# Altium footprint library TitansLib.PcbLib: 333 footprints (part 1 of 21)
Each footprint in its own frame and in the unit in brackets; x right, y up, seen from the top. Pads: shape width x height; smd on the part's side, far side on the other; paste and mask are expansions set on the pad; w line width, h text height; cw(c..) or ccw(c..) is an arc to the next point about the centre after c.
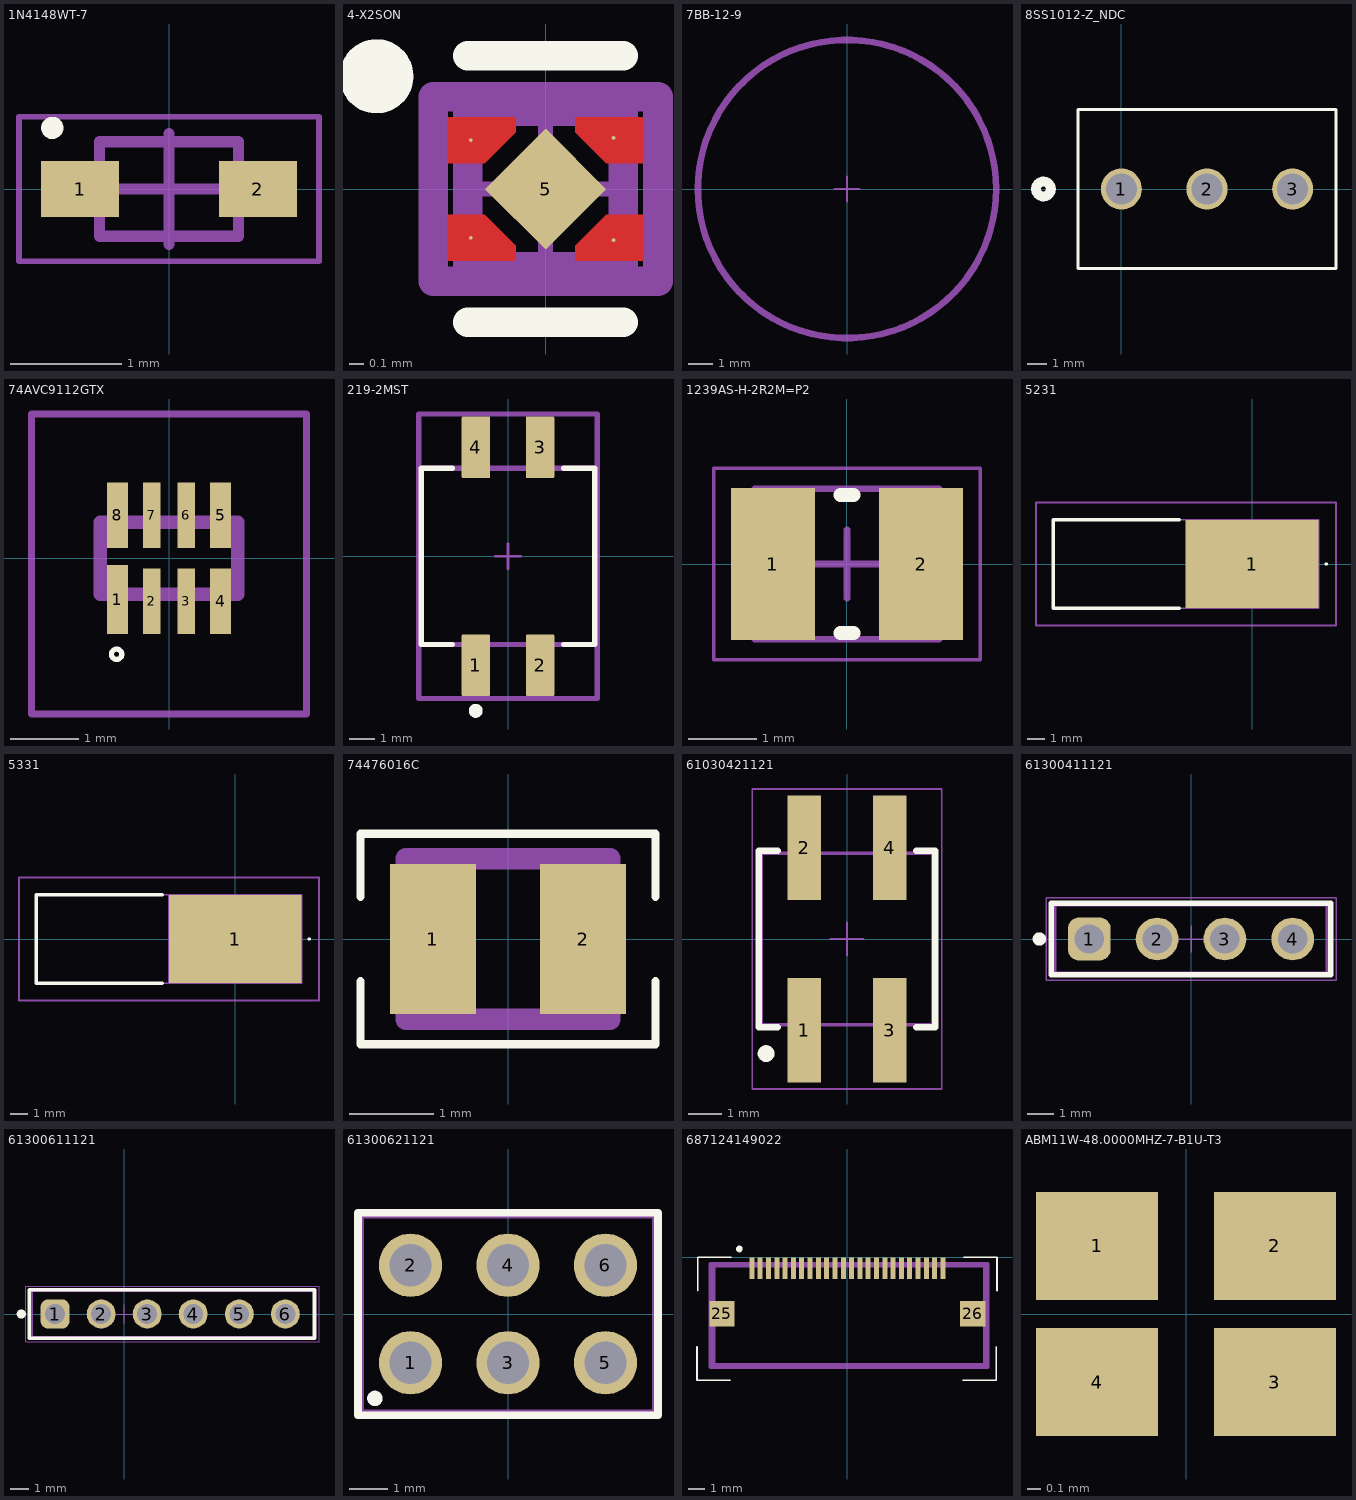
[diagram p0: the footprints below, top view; thin cyan lines are the x and y axes]

## 1N4148WT-7 [mm] "SODFL, 2-Leads, Body 0,80x1,60mm, IPC Low Density"
height 0.65
pads (2):
  rect 0.7x0.5 smd: 1(-0.8,0) 2(0.8,0)
Top Overlay:
  circle w0.1: c-1.05,0.55 r0.05
Top Courtyard:
  lines w0.05: -1.35,-0.65 -1.35,0.65 1.35,0.65 1.35,-0.65 -1.35,-0.65
  lines w0.1: -0.5,0 0.5,0 ; 0,-0.5 0,0.5
Top Assembly:
  lines w0.1: -0.625,-0.425 -0.625,0.425 0.625,0.425 0.625,-0.425 -0.625,-0.425
3D body "Diode_Diodes_Inc_SDM03U40-7_eec.STEP": height 0.25, standoff 0, extent -1.1,-0.525 1.1,0.525

## 4-X2SON [mil]
pads (5):
  round 1 smd paste-99999 mask-39370.1: 1(-19.88,12.99)
  round 1 smd paste-39370.1 mask-39370.1: 2(-19.88,-12.99) 3(18.08,-13.6) 4(18.08,13.6)
  rect 22.83x22.83 smd rot 135 paste-39370.1 mask-39370.1: 5(0,0)
Top Layer:
  region: -25.98,-19.09 -7.87,-19.09 -7.87,-15.16 -16.14,-6.89 -25.98,-6.89
  region: 25.98,19.09 7.87,19.09 7.87,15.16 16.14,6.89 25.98,6.89
  region: 25.98,-19.09 7.87,-19.09 7.87,-15.16 16.14,-6.89 25.98,-6.89
  region: -25.98,19.09 -7.87,19.09 -7.87,15.16 -16.14,6.89 -25.98,6.89
Top Overlay:
  circle w9.84: c-45,30 r4.92
  lines w7.87: -20.67,-35.43 20.67,-35.43 ; -20.67,35.43 20.67,35.43
Top Paste:
  region: -12.53,0 0,-12.53 12.53,0 0,12.53
  region: 25.59,-17.13 9.84,-17.13 9.84,-15.94 16.93,-8.86 25.59,-8.86
  region: -25.59,-17.13 -9.84,-17.13 -9.84,-15.94 -16.93,-8.86 -25.59,-8.86
  region: 25.59,17.13 9.84,17.13 9.84,15.94 16.93,8.86 25.59,8.86
  region: -25.59,17.13 -9.84,17.13 -9.84,15.94 -16.93,8.86 -25.59,8.86
Top Solder:
  region: -13.36,0 0,-13.36 13.36,0 0,13.36
  region: -24.02,-17.13 -9.84,-17.13 -9.84,-15.94 -16.93,-8.86 -24.02,-8.86
  region: 24.02,-17.13 9.84,-17.13 9.84,-15.94 16.93,-8.86 24.02,-8.86
  region: 24.02,17.13 9.84,17.13 9.84,15.94 16.93,8.86 24.02,8.86
  region: -24.02,17.13 -9.84,17.13 -9.84,15.94 -16.93,8.86 -24.02,8.86
Top 3D Body:
  lines w7.87: -20.67,-20.67 -20.67,20.67 20.67,20.67 20.67,-20.67 -20.67,-20.67
Top Courtyard:
  lines w7.87: -29.92,-24.61 -29.92,24.61 29.92,24.61 29.92,-24.61 -29.92,-24.61
Top Component Center:
  lines w3.94: -19.68,0 19.68,0 ; 0,-19.68 0,19.68
Top Assembly:
  lines w7.87: -29.92,-24.61 -29.92,24.61 29.92,24.61 29.92,-24.61 -29.92,-24.61
3D body "IC_Texas_Instruments_LP5907SNX-2_8-NOPB_eec.STEP": height 10, standoff 0, extent -29.92,-24.61 29.92,24.61

## 7BB-12-9 [mm]
Top 3D Body:
  circle w0.15: c0,0 r6.1
Top Courtyard:
  lines w0.2: -6.2,0 cw(c0,0) 6.2,0 cw(c0,0) -6.2,0
Top Component Center:
  lines w0.1: -0.5,0 0.5,0 ; 0,-0.5 0,0.5
3D body "Speak_Murata_7BB-12-9_eec.STEP": height 0.25, standoff 0, extent -6.2,-6.2 6.2,6.2

## 8SS1012-Z_NDC [mil]
pads (3):
  round 83 / inner round 60 / far side round 83 hole 63 paste-99999 mask+0: 1(0,0) 2(173.23,0) 3(346.46,0)
Top Overlay:
  circle w20: c-157.77,0 r15
  lines w6: -87.77,-160.5 434.23,-160.5 434.23,160.5 -87.77,160.5 -87.77,-160.5
Bottom Overlay:
  circle w20: c-157.77,0 r15
3D body "8SS1012-Z.stp": height 610.24, standoff -184.88, extent -82.68,-155.51 429.13,155.51

## 74AVC9112GTX [mm]
pads (8):
  rect 0.3x1 smd: 1(-0.75,-0.6)
  rect 0.25x0.95 smd: 2(-0.25,-0.625) 3(0.25,-0.625) 6(0.25,0.625) 7(-0.25,0.625)
  rect 0.3x0.95 smd: 4(0.75,-0.625) 5(0.75,0.625) 8(-0.75,0.625)
Top Overlay:
  lines w0.075: -0.837,-1.397 cw(c-0.762,-1.397) -0.687,-1.397 cw(c-0.762,-1.397) -0.837,-1.397
Mechanical 13:
  lines w0.2: -1,-0.525 1,-0.525 1,0.525 -1,0.525 -1,-0.525
Mechanical 15:
  lines w0.1: -2,-2.266 2,-2.266 2,2.1 -2,2.1 -2,-2.266
3D body "74LVC2G53GT,115.stp": height 0.48, standoff 0, extent -0.975,-0.584 0.975,0.416

## 219-2MST [mil]
pads (4):
  rrect8% 44x96 smd paste+0 mask+1.97: 1(-50,-169.5) 2(50,-169.5) 3(50,169.5) 4(-50,169.5)
Top Overlay:
  circle w11.81: c-50.2,-240.55 r4.92
  lines w7.87: -86.76,-137 -135,-137 -135,137 -86.76,137 ; 86.76,-137 135,-137 135,137 86.76,137
Top 3D Body:
  lines w7.87: -135,-137 -135,137 135,137 135,-137 -135,-137
Top Courtyard:
  lines w7.87: -138.94,-221.44 -138.94,221.44 138.94,221.44 138.94,-221.44 -138.94,-221.44
Top Component Center:
  lines w3.94: -19.68,0 19.68,0 ; 0,-19.68 0,19.68
Top Assembly:
  lines w7.87: -138.94,-221.44 -138.94,221.44 138.94,221.44 138.94,-221.44 -138.94,-221.44
3D body "Switch_CTS_Components_219-2MST_eec.STEP": height 10, standoff 0, extent -138.94,-221.44 138.94,221.44

## 1239AS-H-2R2M=P2 [mm] "Chip Inductor, 2-Leads, Body 2,50x2,00mm, IPC Medium Density"
height 1.2
pads (2):
  rect 1.23x2.22 smd: 1(-1.085,0) 2(1.085,0)
Top Overlay:
  lines w0.2: -0.1,-1.01 0.1,-1.01 ; -0.1,1.01 0.1,1.01
Top Courtyard:
  lines w0.05: -1.95,-1.4 -1.95,1.4 1.95,1.4 1.95,-1.4 -1.95,-1.4
  lines w0.1: -0.5,0 0.5,0 ; 0,-0.5 0,0.5
Top Assembly:
  lines w0.1: -1.35,-1.1 -1.35,1.1 1.35,1.1 1.35,-1.1 -1.35,-1.1
3D body: height 1.2, standoff 0, extent -0.75,-1.1 0.75,1.1
3D body: height 1.2, standoff 0, extent -1.35,-1.1 -0.75,1.1
3D body: height 1.2, standoff 0, extent 0.75,-1.1 1.35,1.1

## 5231 [mm]
pads (1):
  rect 7.62x5.08 smd: 1(0,0)
Top Overlay:
  lines w0.1: 4.2,0 ccw(c4.25,0) 4.3,0 ccw(c4.25,0) 4.2,0
  lines w0.2: -4.2,-2.54 -11.43,-2.54 -11.43,2.54 -4.2,2.54
Mechanical 13:
  lines w0.1: -3.81,-2.54 -11.43,-2.54 -11.43,2.54 -3.81,2.54 ; -3.81,-2.54 -3.81,2.54 ; -3.81,-2.54 3.81,-2.54 3.81,2.54 -3.81,2.54
Mechanical 15:
  lines w0.1: -12.43,-3.54 -12.43,3.54 4.81,3.54 4.81,-3.54 -12.43,-3.54
3D body "5231.stp": height 14.44, standoff 0, extent -11.306,-2.54 3.68,2.54

## 5331 [mm]
pads (1):
  rect 7.62x5.08 smd: 1(0,0)
Top Overlay:
  lines w0.1: 4.2,0 ccw(c4.25,0) 4.3,0 ccw(c4.25,0) 4.2,0
  lines w0.2: -4.2,-2.54 -11.43,-2.54 -11.43,2.54 -4.2,2.54
Mechanical 13:
  lines w0.1: -3.81,-2.54 -11.43,-2.54 -11.43,2.54 -3.81,2.54 ; -3.81,-2.54 -3.81,2.54 ; -3.81,-2.54 3.81,-2.54 3.81,2.54 -3.81,2.54
Mechanical 15:
  lines w0.1: -12.43,-3.54 -12.43,3.54 4.81,3.54 4.81,-3.54 -12.43,-3.54
3D body "keystone-PN5331.STEP": height 13.83, standoff 0, extent -11.43,-2.54 3.81,2.54

## 74476016C [mm]
pads (2):
  rect 1.02x1.78 smd: 1(-0.89,0) 2(0.89,0)
Top Overlay:
  lines w0.1: -1.75,-0.5 -1.75,-1.25 1.75,-1.25 1.75,-0.5 ; -1.75,0.5 -1.75,1.25 1.75,1.25 1.75,0.5
Top Assembly:
  lines w0.1: -1.133,-0.873 -1.133,0.873 1.133,0.873 1.133,-0.873 -1.133,-0.873
  text ".Designator" at -0.875,-0.187 h1
Mechanical 15:
  lines w0.254: -1.21,-0.95 -1.21,0.95 1.21,0.95 1.21,-0.95 -1.21,-0.95
3D body "74476016C.stp": height 1.29, standoff -0.03, extent -1.151,-0.84 1.129,0.86

## 61030421121 [mm] "Pin Header, pitch 2.54 mm, SMD, Vertical, dual row, 4p"
height 9.6
pads (4):
  rect 1x3.1 smd: 1(-1.27,-2.7) 2(-1.27,2.7) 3(1.27,-2.7) 4(1.27,2.7)
Top Overlay:
  circle w0.25: c-2.4,-3.4 r0.125
  lines w0.2: -2.065,-2.615 -2.615,-2.615 -2.615,2.615 -2.065,2.615 ; 2.065,-2.615 2.615,-2.615 2.615,2.615 2.065,2.615
Top Courtyard:
  lines w0.05: -2.815,-4.45 -2.815,4.45 2.815,4.45 2.815,-4.45 -2.815,-4.45
Top Component Center:
  lines w0.05: -0.5,0 0.5,0 ; 0,-0.5 0,0.5
Top Component Outline:
  lines w0.1: -1.59,-2.54 -1.59,-3.75 -0.95,-3.75 -0.95,-2.54 ; -1.59,2.54 -1.59,3.75 -0.95,3.75 -0.95,2.54 ; 0.95,-2.54 0.95,-3.75 1.59,-3.75 1.59,-2.54 ; 0.95,2.54 0.95,3.75 1.59,3.75 1.59,2.54 ; -2.54,-2.54 2.54,-2.54 2.54,2.54 -2.54,2.54 -2.54,-2.54
3D body "61030421121.stp": height 9.62, standoff 0.02, extent -2.54,-3.75 2.54,3.75

## 61300411121 [mm] "Pin Header, pitch 2.54 mm, THT, Vertical, single row, 4p"
height 8.54
pads (4):
  rrect50% 1.6x1.6 hole 1.1: 1(-3.81,0)
  round 1.6 hole 1.1: 2(-1.27,0) 3(1.27,0) 4(3.81,0)
Top Overlay:
  circle w0.25: c-5.68,0 r0.125
  lines w0.2: -5.23,-1.345 -5.23,1.345 5.23,1.345 5.23,-1.345 -5.23,-1.345
Top Courtyard:
  lines w0.05: -5.43,-1.545 5.43,-1.545 5.43,1.545 -5.43,1.545 -5.43,-1.545
Top Component Center:
  lines w0.05: -0.5,0 0.5,0 ; 0,-0.5 0,0.5
Top Designator:
  text ".Designator" at -7.498,-0.5 h1.5
Top Component Outline:
  lines w0.1: -5.08,-1.27 5.08,-1.27 5.08,1.27 -5.08,1.27 -5.08,-1.27
3D body "61300411121.stp": height 8.57, standoff -2.97, extent -5.08,-1.27 5.08,1.27

## 61300611121 [mm]
pads (6):
  rrect50% 1.6x1.6 hole 1.1: 1(-3.81,0)
  round 1.6 hole 1.1: 2(-1.27,0) 3(1.27,0) 4(3.81,0) 5(6.35,0) 6(8.89,0)
Top Overlay:
  circle w0.25: c-5.68,0 r0.125
  lines w0.2: -5.23,-1.345 -5.23,1.345 10.5,1.345 10.5,-1.345 -5.23,-1.345
Top Courtyard:
  lines w0.05: -5.43,-1.545 10.75,-1.545 10.75,1.545 -5.43,1.545 -5.43,-1.545
Top Component Center:
  lines w0.05: -0.5,0 0.5,0 ; 0,-0.5 0,0.5
Top Designator:
  text ".Designator" at -7.498,-0.5 h1.5
Top Component Outline:
  lines w0.1: -5.08,-1.27 10.5,-1.27 10.5,1.27 -5.08,1.27 -5.08,-1.27
3D body "Download_STP_61300611121+(rev1).stp": height 8.55, standoff -2.99, extent -5.133,-1.171 10.107,1.369

## 61300621121 [mm]
pads (6):
  round 1.65 hole 1.1: 1(-2.54,-1.27) 2(-2.54,1.27) 3(0,-1.27) 4(0,1.27) 5(2.54,-1.27) 6(2.54,1.27)
Top Overlay:
  circle w0.2: c-3.47,-2.2 r0.1
  lines w0.2: -3.91,-2.64 -3.91,2.64 3.91,2.64 3.91,-2.64 -3.91,-2.64
Mechanical 13:
  lines w0.1: -3.81,-2.54 -3.81,2.54 3.81,2.54 3.81,-2.54 -3.81,-2.54
3D body "61300621121.stp": height 8.57, standoff -2.97, extent -3.81,-2.54 3.81,2.54

## 687124149022 [mm]
pads (26):
  rect 0.3x1.3 smd mask+0.1: 1(-5.75,-0.65) 2(-5.25,-0.65) 3(-4.75,-0.65) 4(-4.25,-0.65) 5(-3.75,-0.65) 6(-3.25,-0.65) 7(-2.75,-0.65) 8(-2.25,-0.65) 9(-1.75,-0.65) 10(-1.25,-0.65) 11(-0.75,-0.65) 12(-0.25,-0.65) 13(0.25,-0.65) 14(0.75,-0.65) 15(1.25,-0.65) 16(1.75,-0.65) 17(2.25,-0.65) 18(2.75,-0.65) 19(3.25,-0.65) 20(3.75,-0.65) 21(4.25,-0.65) 22(4.75,-0.65) 23(5.25,-0.65) 24(5.75,-0.65)
  rect 1.524x1.524 smd mask+0.1: 25(-7.55,-3.4) 26(7.55,-3.4)
Top Overlay:
  circle w0.254: c-6.5,0.5 r0.072
  lines w0.1: -9.05,-5.4 -9.05,-7.4 -7.05,-7.4 ; -9,-2 -9,0 -7,0 ; 6.95,-7.4 8.95,-7.4 8.95,-5.4 ; 7,0 9,0 9,-2
Top Assembly:
  lines w0.254: -8.075,-6.5 8.275,-6.5 8.275,-0.5 -8.075,-0.5 -8.075,-6.5
  text ".Designator" at -1.71,-3.652 h1
Mechanical 15:
  lines w0.254: -8.227,-6.602 8.423,-6.602 8.423,-0.402 -8.227,-0.402 -8.227,-6.602
3D body "687124149022.stp": height 2.4, standoff 0, extent -8.37,-7.035 8.37,-0.015

## ABM11W-48.0000MHZ-7-B1U-T3 [mm]
pads (4):
  rect 0.875x0.775 smd mask+0.05: 1(-0.637,0.487) 2(0.637,0.487) 3(0.637,-0.487) 4(-0.637,-0.487)
3D body "ABM11W-48.0000MHZ-7-B1U-T3--3DModel-STEP-400430.STEP": height 0.51, standoff 0.01, extent -1,-0.8 1,0.8